# Altium footprint library PCB1.PcbLib: 40 footprints (part 1 of 3)
Each footprint in its own frame and in the unit in brackets; x right, y up, seen from the top. Pads: shape width x height; smd on the part's side, far side on the other; paste and mask are expansions set on the pad; w line width, h text height; cw(c..) or ccw(c..) is an arc to the next point about the centre after c.
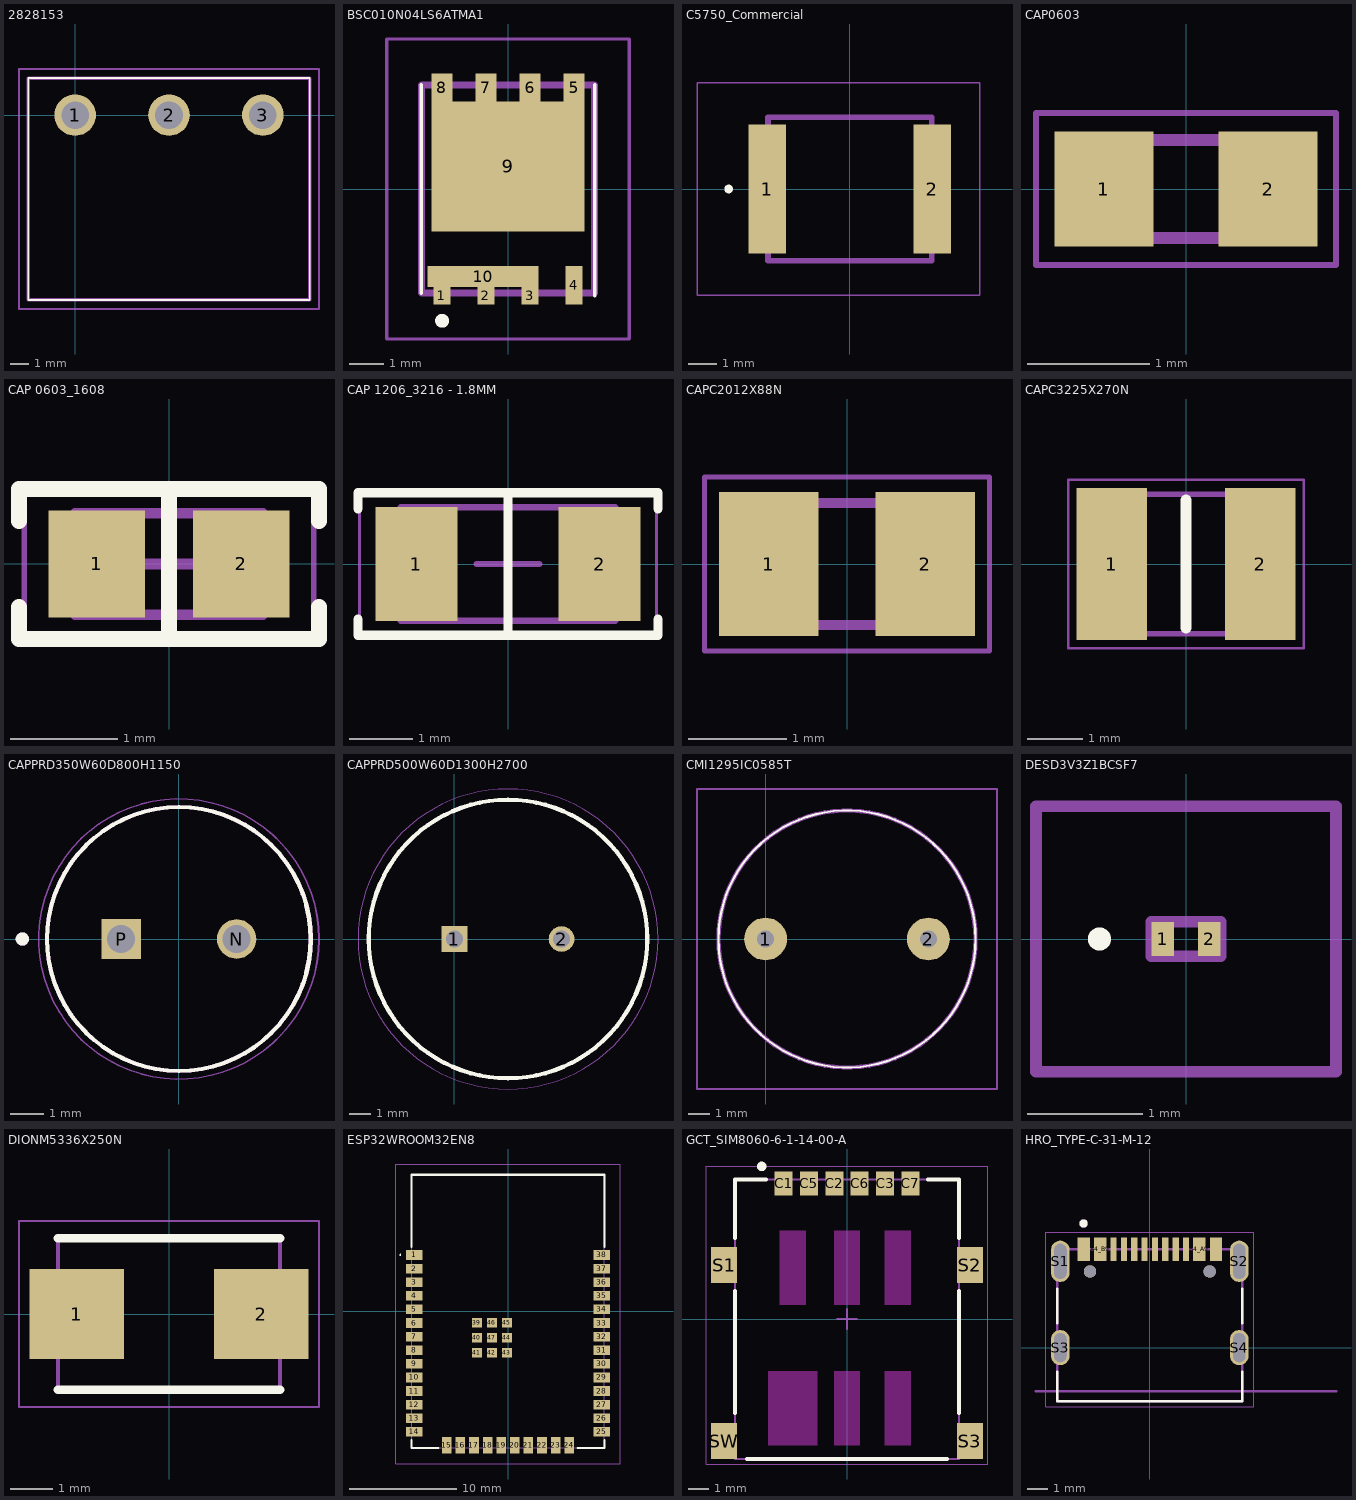
[diagram p0: the footprints below, top view; thin cyan lines are the x and y axes]

## 2828153 [mm]
pads (3):
  round 2.25 hole 1.5: 1(0,0) 2(5.08,0) 3(10.16,0)
Top Overlay:
  lines w0.1: -2.54,-10 -2.54,2 12.7,2 12.7,-10 -2.54,-10
Mechanical 13:
  lines w0.2: -2.54,-10 -2.54,2 12.7,2 12.7,-10 -2.54,-10
Mechanical 15:
  lines w0.1: -3.04,-10.5 -3.04,2.5 13.2,2.5 13.2,-10.5 -3.04,-10.5
3D body "282815-3.stp": height 8.46, standoff -3.39, extent -2.54,-10 12.7,2

## BSC010N04LS6ATMA1 [mm]
pads (10):
  rect 0.5x0.5 smd: 1(-1.905,-3.075) 2(-0.635,-3.075) 3(0.635,-3.075)
  rect 0.5x1.1 smd: 4(1.905,-2.775)
  rect 0.6x0.8 smd: 5(1.905,2.925) 6(0.635,2.925) 7(-0.635,2.925) 8(-1.905,2.925)
  rect 4.41x3.75 smd: 9(0,0.65)
  rect 3.2x0.6 smd: 10(-0.715,-2.525)
Top Overlay:
  lines w0.1: -2.5,-3 -2.5,3 ; 2.5,-3.075 2.5,3
  lines w0.2: -2,-3.8 ccw(c-1.9,-3.8) -1.8,-3.8 ccw(c-1.9,-3.8) -2,-3.8
Mechanical 13:
  lines w0.2: -2.5,-3 2.5,-3 2.5,3 -2.5,3 -2.5,-3
Mechanical 15:
  lines w0.1: -3.5,-4.325 3.5,-4.325 3.5,4.325 -3.5,4.325 -3.5,-4.325
3D body "BSC014N06NSATMA1.stp": height 1.1, standoff 0, extent -2.695,-3.075 2.695,3.075

## C5750_Commercial [mm]
pads (2):
  rect 1.3x4.5 smd: 1(-2.875,0) 2(2.875,0)
Top Overlay:
  circle w0.2: c-4.225,0 r0.05
Mechanical 13:
  lines w0.2: -2.85,-2.5 -2.85,2.5 2.85,2.5 2.85,-2.5 -2.85,-2.5
Mechanical 15:
  lines w0.05: -5.325,-3.7 -5.325,3.7 4.525,3.7 4.525,-3.7 -5.325,-3.7
3D body "C5750X5R1H106K230KA.stp": height 2.77, standoff 0.03, extent -2.65,-2.45 2.65,2.45

## CAP0603 [mm]
pads (2):
  rect 0.81x0.94 smd: 1(-0.67,0) 2(0.67,0)
Mechanical 13:
  lines w0.1: -0.8,-0.4 -0.8,0.4 0.8,0.4 0.8,-0.4 -0.8,-0.4
Mechanical 15:
  lines w0.05: -1.225,-0.62 -1.225,0.62 1.225,0.62 1.225,-0.62 -1.225,-0.62
3D body "TMK107BLD105MA-T.stp": height 0.9, standoff 0, extent -0.8,-0.4 0.8,0.4

## CAP 0603_1608 [mm]
pads (2):
  rect 0.9x1 smd: 1(-0.675,0) 2(0.675,0)
Top Overlay:
  lines w0.15: -1.4,-0.4 -1.4,-0.7 1.4,-0.7 1.4,-0.4 ; -1.4,0.4 -1.4,0.7 1.4,0.7 1.4,0.4 ; 0,-0.7 0,0.7
Mechanical 13:
  lines w0.1: -0.875,-0.475 0.875,-0.475 0.875,0.475 -0.875,0.475 -0.875,-0.475
Mechanical 15:
  lines w0.05: -1.35,-0.75 1.35,-0.75 1.35,0.75 -1.35,0.75 -1.35,-0.75
  lines w0.1: -0.475,0 0.475,0 ; 0,-0.475 0,0.475
3D body "0603 cap.STEP": height 0.82, standoff 0, extent -0.8,-0.412 0.8,0.412

## CAP 1206_3216 - 1.8MM [mm]
pads (2):
  rect 1.3x1.8 smd: 1(-1.45,0) 2(1.45,0)
Top Overlay:
  lines w0.15: -2.375,-0.875 -2.375,-1.125 2.375,-1.125 2.375,-0.875 ; -2.375,0.875 -2.375,1.125 2.375,1.125 2.375,0.875 ; 0,-1.125 0,1.125
Mechanical 13:
  lines w0.1: -1.7,-0.9 1.7,-0.9 1.7,0.9 -1.7,0.9 -1.7,-0.9
Mechanical 15:
  lines w0.05: -2.35,-1.15 2.35,-1.15 2.35,1.15 -2.35,1.15 -2.35,-1.15
  lines w0.1: -0.5,0 0.5,0 ; 0,-0.5 0,0.5
3D body "CAP 1206-1.8mm.STEP": height 1.8, standoff 0, extent -1.6,-0.8 1.6,0.8

## CAPC2012X88N [mm]
pads (2):
  rect 1.02x1.47 smd: 1(-0.8,0) 2(0.8,0)
Mechanical 13:
  lines w0.1: -1,-0.625 1,-0.625 1,0.625 -1,0.625 -1,-0.625
Mechanical 15:
  lines w0.05: -1.46,-0.89 1.46,-0.89 1.46,0.89 -1.46,0.89 -1.46,-0.89
3D body "C0805C104M5RAC-TU.stp": height 0.88, standoff 0, extent -1.1,-0.73 1.1,0.72

## CAPC3225X270N [mm]
pads (2):
  rect 1.26x2.72 smd: 1(-1.33,0) 2(1.33,0)
Top Overlay:
  lines w0.2: 0,-1.15 0,1.15
Mechanical 13:
  lines w0.1: -1.6,-1.25 1.6,-1.25 1.6,1.25 -1.6,1.25 -1.6,-1.25
Mechanical 15:
  lines w0.05: -2.11,-1.51 2.11,-1.51 2.11,1.51 -2.11,1.51 -2.11,-1.51
3D body "GRM32ER61C476KE15L.stp": height 2.7, standoff 0, extent -1.6,-1.25 1.6,1.25

## CAPPRD350W60D800H1150 [mm]
pads (2):
  round 1.2 hole 0.85: N(1.75,0)
  rect 1.2x1.2 / inner round 1.2 / far side rect 1.2x1.2 hole 0.85: P(-1.75,0)
Top Overlay:
  circle w0.2: c-4.75,0 r0.1
  circle w0.127: c0,0 r4
Mechanical 13:
  circle w0.2: c-4.75,0 r0.1
  circle w0.127: c0,0 r4
Mechanical 15:
  circle w0.05: c0,0 r4.25
3D body "step_temp.STEP": height 11.5, standoff -17, extent -4,-4 4,4

## CAPPRD500W60D1300H2700 [mm]
pads (2):
  rect 1.2x1.2 hole 0.8: 1(0,0)
  round 1.2 hole 0.8: 2(5,0)
Top Overlay:
  circle w0.2: c2.5,0 r6.5
Mechanical 13:
  circle w0.1: c2.5,0 r6.5
Mechanical 15:
  circle w0.05: c2.5,0 r7
3D body "ElCapVT-5.0-13x25-black.step": height 25, standoff -3, extent -3.961,-6.491 9.03,6.491

## CMI1295IC0585T [mm]
pads (2):
  round 2 hole 0.8: 1(0,0) 2(7.6,0)
Top Overlay:
  lines w0.1: -2.2,0 cw(c3.8,0) 9.8,0 cw(c3.8,0) -2.2,0
Mechanical 13:
  lines w0.2: -2.2,0 ccw(c3.8,0) 9.8,0 ccw(c3.8,0) -2.2,0
Mechanical 15:
  lines w0.1: -3.2,-7 10.8,-7 10.8,7 -3.2,7 -3.2,-7
3D body "CMI-1295IC-0585T.stp": height 9.63, standoff -5.37, extent -2.19,-5.988 9.81,6

## DESD3V3Z1BCSF7 [mm]
pads (2):
  rect 0.194x0.291 smd: 1(-0.2,0) 2(0.2,0)
Top Overlay:
  lines w0.1: -0.8,0 ccw(c-0.75,0) -0.7,0 ccw(c-0.75,0) -0.8,0
Mechanical 13:
  lines w0.1: -0.3,-0.15 0.3,-0.15 0.3,0.15 -0.3,0.15 -0.3,-0.15
Mechanical 15:
  lines w0.1: -1.3,-1.15 1.3,-1.15 1.3,1.15 -1.3,1.15 -1.3,-1.15
3D body "DESD3V3Z1BCSF-7.stp": height 0.42, standoff 0, extent -0.3,-0.15 0.3,0.15

## DIONM5336X250N [mm]
pads (2):
  rect 2.25x2.15 smd: 1(-2.2,0) 2(2.2,0)
Top Overlay:
  lines w0.2: -2.648,-1.81 2.648,-1.81 ; -2.648,1.81 2.648,1.81
Mechanical 13:
  lines w0.1: -2.648,-1.81 -2.648,1.81 2.648,1.81 2.648,-1.81 -2.648,-1.81
Mechanical 15:
  lines w0.05: -3.575,-2.22 -3.575,2.22 3.575,2.22 3.575,-2.22 -3.575,-2.22
3D body "SMBJ24CA-13-F.stp": height 2.57, standoff 0.07, extent -2.795,-1.97 2.795,1.97

## ESP32WROOM32EN8 [mm]
pads (47):
  rect 1.5x0.9 smd: 1(-8.75,5.26) 2(-8.75,3.99) 3(-8.75,2.72) 4(-8.75,1.45) 5(-8.75,0.18) 6(-8.75,-1.09) 7(-8.75,-2.36) 8(-8.75,-3.63) 9(-8.75,-4.9) 10(-8.75,-6.17) 11(-8.75,-7.44) 12(-8.75,-8.71) 13(-8.75,-9.98) 14(-8.75,-11.25) 25(8.75,-11.25) 26(8.75,-9.98) 27(8.75,-8.71) 28(8.75,-7.44) 29(8.75,-6.17) 30(8.75,-4.9) 31(8.75,-3.63) 32(8.75,-2.36) 33(8.75,-1.09) 34(8.75,0.18) 35(8.75,1.45) 36(8.75,2.72) 37(8.75,3.99) 38(8.75,5.26)
  rect 0.9x1.5 smd: 15(-5.715,-12.5) 16(-4.445,-12.5) 17(-3.175,-12.5) 18(-1.905,-12.5) 19(-0.635,-12.5) 20(0.635,-12.5) 21(1.905,-12.5) 22(3.175,-12.5) 23(4.445,-12.5) 24(5.715,-12.5)
  rect 0.9x0.9 smd: 39(-2.9,-1.06) 40(-2.9,-2.46) 41(-2.9,-3.86) 42(-1.5,-3.86) 43(-0.1,-3.86) 44(-0.1,-2.46) 45(-0.1,-1.06) 46(-1.5,-1.06) 47(-1.5,-2.46)
Top Overlay:
  lines w0.1: -10.1,5.26 ccw(c-10.05,5.26) -10,5.26 ccw(c-10.05,5.26) -10.1,5.26
  lines w0.2: -9,-12 -9,-12.75 -6.5,-12.75 ; -9,6 -9,12.75 9,12.75 9,6 ; 6.5,-12.75 9,-12.75 9,-12
Mechanical 13:
  lines w0.1: -9,-12.75 9,-12.75 9,12.75 -9,12.75 -9,-12.75
Mechanical 15:
  lines w0.1: -10.5,-14.25 10.5,-14.25 10.5,13.75 -10.5,13.75 -10.5,-14.25
3D body "ESP32-WROOM-32E-N8.stp": height 3.13, standoff 0.02, extent -9,-12.75 9,12.75

## GCT_SIM8060-6-1-14-00-A [mm]
pads (10):
  rect 0.9x1.2 smd: C1(-3.175,6.8) C2(-0.635,6.8) C3(1.905,6.8) C5(-1.905,6.8) C6(0.635,6.8) C7(3.175,6.8)
  rect 1.3x1.8 smd: S1(-6.15,2.7) S2(6.15,2.7) S3(6.15,-6.1) SW(-6.15,-6.1)
Top Overlay:
  circle w0.24: c-4.267,7.645 r0.12
  lines w0.2: -5.6,-4.699 -5.6,1.397 ; -5.6,4.064 -5.6,7 -4.064,7 ; -5,-7 5,-7 ; 4.064,7 5.6,7 5.6,4.064 ; 5.6,-4.699 5.6,1.397
Keep-Out Layer:
  region: -2.06,0.72 -3.36,0.72 -3.36,4.42 -2.06,4.42
  region: 0.65,0.72 -0.65,0.72 -0.65,4.42 0.65,4.42
  region: 3.19,0.72 1.89,0.72 1.89,4.42 3.19,4.42
  region: -1.49,-6.3 -3.93,-6.3 -3.93,-2.6 -1.49,-2.6
  region: 0.65,-6.3 -0.65,-6.3 -0.65,-2.6 0.65,-2.6
  region: 3.19,-6.3 1.89,-6.3 1.89,-2.6 3.19,-2.6
  region: -2.06,0.72 -3.36,0.72 -3.36,4.42 -2.06,4.42
  region: 0.65,0.72 -0.65,0.72 -0.65,4.42 0.65,4.42
  region: 3.19,0.72 1.89,0.72 1.89,4.42 3.19,4.42
  region: -1.49,-6.3 -3.93,-6.3 -3.93,-2.6 -1.49,-2.6
  region: 0.65,-6.3 -0.65,-6.3 -0.65,-2.6 0.65,-2.6
  region: 3.19,-6.3 1.89,-6.3 1.89,-2.6 3.19,-2.6
Mechanical 13:
  lines w0.1: -5.6,-7 5.6,-7 5.6,7 -5.6,7 -5.6,-7
Mechanical 15:
  lines w0.05: -7.05,-7.25 7.05,-7.25 7.05,7.65 -7.05,7.65 -7.05,-7.25
  lines w0.1: -0.5,0 0.5,0 ; 0,-0.5 0,0.5
3D body "sim8060-6-1-14-00-a.stp": height 1.4, standoff -0.03, extent -6.223,-6.923 6.177,7.177

## HRO_TYPE-C-31-M-12 [mm]
pads (18):
  rect 0.6x1.14 smd mask+0.05: A1_B12(-3.2,4.75) A4_B9(-2.4,4.75) B1_A12(3.2,4.75) B4_A9(2.4,4.75)
  rect 0.3x1.14 smd mask+0.05: A5(-1.25,4.75) A6(-0.25,4.75) A7(0.25,4.75) A8(1.25,4.75) B5(1.75,4.75) B6(0.75,4.75) B7(-0.75,4.75) B8(-1.75,4.75)
  oval 0.9x2 hole 0.6 slot 1.7 at 90 deg: S1(-4.325,4.17) S2(4.325,4.17)
  oval 0.9x1.7 hole 0.6 slot 1.4 at 90 deg: S3(-4.325,0) S4(4.325,0)
  round 0.6 hole 0.6 unplated: ""(-2.89,3.68) ""(2.89,3.68)
Top Overlay:
  circle w0.2: c-3.2,6 r0.1
  lines w0.127: -4.47,-1.17 -4.47,-2.6 4.47,-2.6 4.47,-1.17 ; -4.47,1.17 -4.47,2.85 ; 4.47,1.17 4.47,2.85
Mechanical 13:
  circle w0.2: c-3.2,6 r0.1
  lines w0.127: -5.5,-2.11 9,-2.11 ; -4.47,-2.6 -4.47,4.75 4.47,4.75 4.47,-2.6 -4.47,-2.6
Mechanical 15:
  lines w0.05: -5.025,-2.85 5.025,-2.85 5.025,5.57 -5.025,5.57 -5.025,-2.85
3D body "step_temp.STEP": height 3.31, standoff -0.99, extent -4.47,-2.6 4.47,5.305